# Altium schematic symbol library Demo.SchLib: 6 symbols
Pins are listed as number, name and electrical type; pins without a type are passive.

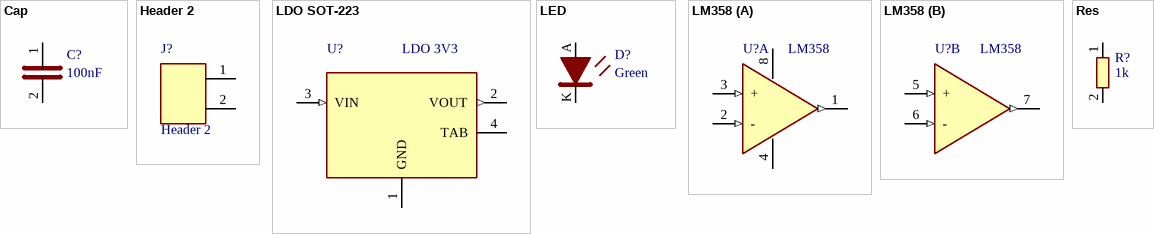
[diagram p0: symbols Cap to Res]

## Cap
designator C?, comment 100nF
Capacitor
footprint 0805 (Chip capacitor, 0805)
pins: 1, 2

## Header 2
designator J?
Header, 2-Pin
footprint HDR1X2 (Header, 2-Pin)
pins: 1 (power), 2 (power)

## LDO SOT-223
designator U?, comment LDO 3V3
Low-dropout regulator, SOT-223
footprint SOT-223 (SOT-223, 4 leads)
pins: 1 GND (power), 2 VOUT (out), 3 VIN (in), 4 TAB

## LED
designator D?, comment Green
Light-emitting diode
footprint LED0805 (Chip LED, 0805)
pins: A, K

## LM358
designator U?
Dual operational amplifier
part A pins: 1 OUT (out), 2 - (in), 3 + (in), 4 V- (power), 8 V+ (power)
part B pins: 5 + (in), 6 - (in), 7 OUT (out)

## Res
designator R?, comment 1k
Resistor
footprint 0805 (Chip resistor, 0805)
pins: 1, 2